# Altium footprint library KM_ALTIUM.PcbLib: 265 footprints (part 5 of 17)
Each footprint in its own frame and in the unit in brackets; x right, y up, seen from the top. Pads: shape width x height; smd on the part's side, far side on the other; paste and mask are expansions set on the pad; w line width, h text height; cw(c..) or ccw(c..) is an arc to the next point about the centre after c.
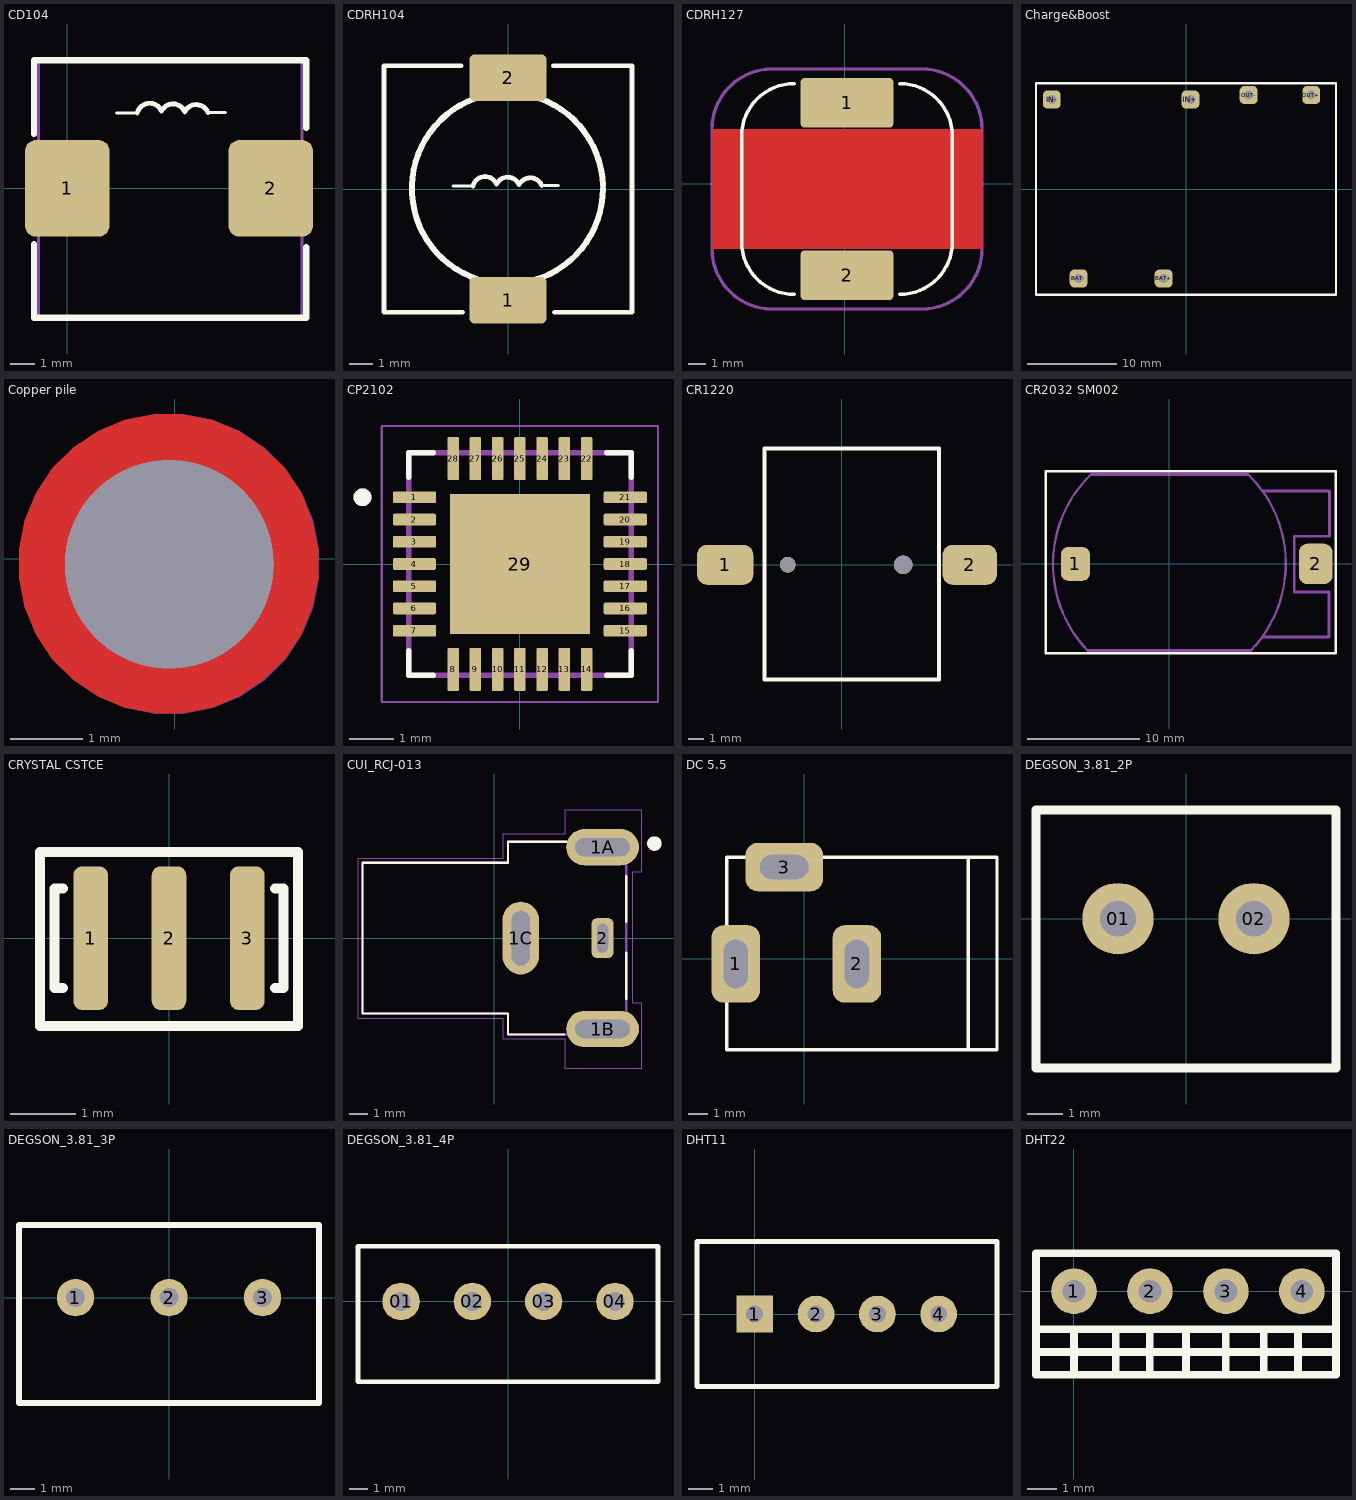
[diagram p4: the footprints below, top view; thin cyan lines are the x and y axes]

## CD104 [mm]
pads (2):
  rrect25% 3.5x4 smd: 1(0,0) 2(8.433,0)
Top Overlay:
  lines w0.127: 2.051,3.117 2.9,3.117 ; 5.832,3.146 6.55,3.146
  lines w0.203: 2.9,3.117 cw(c3.415,2.999) 3.904,3.202 cw(c4.38,2.972) 4.868,3.174 cw(c5.344,2.944) 5.832,3.146
  lines w0.254: -1.372,-2.311 -1.372,-5.359 4.55,-5.359 9.906,-5.359 9.906,-4.635 9.906,-2.438 ; -1.372,2.261 -1.372,5.309 3.839,5.309 9.906,5.309 9.906,2.515
Mechanical 13:
  lines w0.127: -1.194,-5.334 -1.194,5.309 9.728,5.309 9.728,-5.334 -1.194,-5.334
3D body "User Library-cdrh104r.STEP": height 4.01, standoff 0.01, extent -0.983,-5.169 9.517,5.131

## CDRH104 [mm]
pads (2):
  rrect25% 3.3x2 smd: 1(0,-4.742) 2(0,4.742)
Top Overlay:
  lines w0.127: -2.344,0.12 -1.494,0.12 ; 1.438,0.149 2.156,0.149
  lines w0.203: -1.989,5.25 -5.283,5.25 -5.283,-5.25 -1.938,-5.25 ; -1.494,0.12 cw(c-0.979,0.002) -0.49,0.204 cw(c-0.015,-0.026) 0.474,0.177 cw(c0.95,-0.053) 1.438,0.149 ; 1.93,5.25 5.283,5.25 5.283,-5.25 1.981,-5.25 ; 3.175,5.25 3.335,5.25 3.411,5.25
  lines w0.254: 4.045,0.152 ccw(c-0.025,0.025) 4.047,0.025
3D body "User Library-cdrh104r.STEP": height 4.01, standoff 0.01, extent -5.144,-5.25 5.156,5.25

## CDRH127 [mm]
pads (2):
  rrect15% 5.4x2.9 smd: 1(0.127,4.721) 2(0.127,-5.331)
Top Layer:
  pour cut-out: -7.748,3.195 8.002,3.195 8.002,-3.805 -7.748,-3.805
Top Overlay:
  lines w0.2: -2.948,-6.455 cw(c-2.948,-3.38) -6.023,-3.38 -6.023,2.77 cw(c-2.948,2.77) -2.948,5.845 ; 3.202,-6.455 ccw(c3.202,-3.38) 6.277,-3.38 6.277,-0.305 6.277,2.77 ccw(c3.202,2.77) 3.202,5.845
Top Solder:
  pour cut-out: 8.002,3.195 8.877,3.195 8.877,-3.805 8.002,-3.805
  pour cut-out: -8.623,3.195 -7.748,3.195 -7.748,-3.805 -8.623,-3.805
Mechanical 3:
  lines w0.2: -7.748,-3.805 ccw(c-4.248,-3.805) -4.248,-7.305 4.502,-7.305 ccw(c4.502,-3.805) 8.002,-3.805 8.002,3.195 ccw(c4.502,3.195) 4.502,6.695 -4.248,6.695 ccw(c-4.248,3.195) -7.748,3.195 -7.748,-3.805
3D body "SUMIDA-CDRH127.step": height 7.31, standoff -0.14, extent -5.873,-6.476 6.127,5.866

## Charge&Boost [mm]
pads (6):
  rrect50% 2x2 hole 1: BAT+(-2.5,-10) BAT-(-12,-10) IN+(0.5,10) IN-(-15,10) OUT+(14,10.5) OUT-(7,10.5)
Top Overlay:
  lines w0.254: -16.764,-11.811 16.764,-11.811 16.764,11.811 -16.764,11.811 -16.764,-11.811
3D body "Adjustable Step Up 18650 Lithium Battery Charging Discharge Integrated Module.STEP": height 3.8, standoff -0.08, extent -16.763,-12.316 16.637,12.065

## Copper pile [mm]
pads (1):
  round 2.9 hole 2.9 unplated: ""(-0.076,-0.076)
Top Layer:
  pour cut-out: -0.086,-2.154 -0.291,-2.154 -0.694,-2.074 -1.073,-1.917 -1.414,-1.689 -1.704,-1.399 -1.932,-1.057 -2.089,-0.678 -2.17,-0.276 -2.17,-0.071 -2.17,0.135 -2.089,0.537 -1.932,0.916 -1.704,1.257 -1.414,1.548 -1.073,1.776 -0.694,1.933 -0.291,2.013 -0.086,2.013 0.119,2.013 0.522,1.933 0.901,1.776 1.242,1.548 1.532,1.257 1.76,0.916 1.917,0.537 1.997,0.135 1.997,-0.071 1.997,-0.276 1.917,-0.678 1.76,-1.057 1.532,-1.399 1.242,-1.689 0.901,-1.917 0.522,-2.074 0.119,-2.154
Bottom Layer:
  pour cut-out: -0.074,-2.156 -0.28,-2.156 -0.682,-2.076 -1.061,-1.919 -1.402,-1.691 -1.693,-1.401 -1.921,-1.06 -2.078,-0.681 -2.158,-0.278 -2.158,-0.073 -2.158,0.132 -2.078,0.535 -1.921,0.914 -1.693,1.255 -1.402,1.545 -1.061,1.773 -0.682,1.93 -0.28,2.01 -0.074,2.01 0.131,2.01 0.533,1.93 0.913,1.773 1.254,1.545 1.544,1.255 1.772,0.914 1.929,0.535 2.009,0.132 2.009,-0.073 2.009,-0.278 1.929,-0.681 1.772,-1.06 1.544,-1.401 1.254,-1.691 0.913,-1.919 0.533,-2.076 0.131,-2.156
Top Solder:
  region: -0.076,-2.16 -0.281,-2.16 -0.684,-2.08 -1.063,-1.923 -1.404,-1.694 -1.694,-1.404 -1.923,-1.063 -2.08,-0.684 -2.16,-0.281 -2.16,-0.076 -2.16,0.129 -2.08,0.532 -1.923,0.911 -1.694,1.252 -1.404,1.542 -1.063,1.77 -0.684,1.927 -0.281,2.007 -0.076,2.007 0.129,2.007 0.532,1.927 0.911,1.77 1.252,1.542 1.542,1.252 1.77,0.911 1.927,0.532 2.007,0.129 2.007,-0.076 2.007,-0.281 1.927,-0.684 1.77,-1.063 1.542,-1.404 1.252,-1.694 0.911,-1.923 0.532,-2.08 0.129,-2.16
Bottom Solder:
  region: -0.076,-2.16 -0.281,-2.16 -0.684,-2.08 -1.063,-1.923 -1.404,-1.694 -1.694,-1.404 -1.923,-1.063 -2.08,-0.684 -2.16,-0.281 -2.16,-0.076 -2.16,0.129 -2.08,0.532 -1.923,0.911 -1.694,1.252 -1.404,1.542 -1.063,1.77 -0.684,1.927 -0.281,2.007 -0.076,2.007 0.129,2.007 0.532,1.927 0.911,1.77 1.252,1.542 1.542,1.252 1.77,0.911 1.927,0.532 2.007,0.129 2.007,-0.076 2.007,-0.281 1.927,-0.684 1.77,-1.063 1.542,-1.404 1.252,-1.694 0.911,-1.923 0.532,-2.08 0.129,-2.16

## CP2102 [mm] "QFN-28"
pads (29):
  rrect25% 0.97x0.26 smd: 1(-2.37,1.5) 2(-2.37,1) 3(-2.37,0.5) 4(-2.37,0) 5(-2.37,-0.5) 6(-2.37,-1) 7(-2.37,-1.5) 15(2.37,-1.5) 16(2.37,-1) 17(2.37,-0.5) 18(2.37,0) 19(2.37,0.5) 20(2.37,1) 21(2.37,1.5)
  rrect25% 0.26x0.97 smd: 8(-1.5,-2.37) 9(-1,-2.37) 10(-0.5,-2.37) 11(0,-2.37) 12(0.5,-2.37) 13(1,-2.37) 14(1.5,-2.37) 22(1.5,2.37) 23(1,2.37) 24(0.5,2.37) 25(0,2.37) 26(-0.5,2.37) 27(-1,2.37) 28(-1.5,2.37)
  rect 3.15x3.15 smd paste-0.575: 29(0,0)
Top Overlay:
  circle w0.2: c-3.54,1.5 r0.1
  lines w0.127: -2.5,-1.95 -2.5,-2.5 -1.95,-2.5 ; -2.5,1.95 -2.5,2.5 -1.95,2.5 ; 1.95,-2.5 2.5,-2.5 2.5,-1.95 ; 1.95,2.5 2.5,2.5 2.5,1.95
Mechanical 13:
  circle w0.2: c-3.54,1.5 r0.1
  lines w0.127: -2.5,-2.5 -2.5,2.5 2.5,2.5 2.5,-2.5 -2.5,-2.5
Mechanical 15:
  lines w0.05: -3.105,-3.105 -3.105,3.105 3.105,3.105 3.105,-3.105 -3.105,-3.105
3D body "CP2102.STEP": height 1, standoff 0, extent -2.5,-2.5 2.5,2.5

## CR1220 [mm]
pads (4):
  rrect50% 3.66x2.6 smd: 1(-7.57,0)
  rrect50% 3.54x2.6 smd: 2(8.332,0)
  round 1.016 hole 1.016 unplated: ""(-3.5,0)
  round 1.2 hole 1.2 unplated: ""(4,0)
Top Overlay:
  lines w0.254: -5.004,-7.468 -5.004,7.569 6.325,7.569 6.325,-7.468 -5.004,-7.468
3D body "User Library-Battery Holder for CR1220 SMD.STEP": height 4.26, standoff -0.49, extent -8.968,-7.366 9.832,7.383

## CR2032 SM002 [mm]
pads (2):
  rrect50% 2.6x3 smd: 1(-8.363,0)
  rrect50% 3x3.6 smd: 2(13.037,0)
Top Overlay:
  lines w0.254: -10.998,-7.95 -10.998,8.255 14.808,8.255 14.808,-7.95 -10.998,-7.95
Mechanical 13:
  lines w0.203: -7.29,-7.696 cw(c0.762,-0.025) -6.986,7.952 ; 7.024,7.964 cw(c-0.749,0.013) 7.264,-7.696
  lines w0.254: -7.29,-7.696 7.264,-7.696 ; -6.934,7.95 6.985,7.95 ; 8.28,6.5 14.249,6.5 ; 8.357,-6.5 14.199,-6.5 14.199,-2.489 11.125,-2.489 11.125,2.464 14.249,2.464 14.249,6.475
3D body "60488.stp": height 5.41, standoff 0.01, extent -10.413,-7.721 14.237,7.874

## CRYSTAL CSTCE [mm]
height 1
pads (3):
  rrect50% 0.53x2.2 smd: 1(-1.2,0) 2(0,0) 3(1.2,0)
Top Overlay:
  lines w0.152: -1.626,-0.762 -1.753,-0.762 -1.753,0.762 -1.626,0.762 ; 1.626,-0.762 1.753,-0.762 1.753,0.762 1.626,0.762 ; -1.981,-1.346 1.981,-1.346 1.981,1.321 -1.981,1.321 -1.981,-1.346
Mechanical 16:
  lines w0.152: -1.981,-1.346 -1.981,1.321 1.981,1.321 1.981,-1.346 -1.981,-1.346
3D body "SW3dPS-CSTCE.STEP": height 0.7, standoff 0, extent -1.6,-0.65 1.6,0.65

## CUI_RCJ-013 [mm]
pads (4):
  oval 4x2 hole 1 slot 3 at 0 deg: 1A(5.95,5) 1B(5.95,-5)
  oval 2x4 hole 3 slot 1 at 0 deg: 1C(1.45,0)
  rrect50% 1.2x2.2 hole 1.6 slot 0.6 at 0 deg: 2(5.95,0)
Top Overlay:
  circle w0.4: c8.8,5.2 r0.2
  lines w0.127: 3.85,-5.3 0.75,-5.3 0.75,-4.15 -7.25,-4.15 -7.25,4.15 0.75,4.15 0.75,5.3 3.95,5.3 ; 7.25,-3.35 7.25,-0.8 ; 7.25,0.9 7.25,3.4
Mechanical 13:
  lines w0.127: -7.25,-4.15 0.75,-4.15 0.75,-5.3 7.25,-5.3 7.25,5.3 0.75,5.3 0.75,4.15 -7.25,4.15 -7.25,-4.15
Mechanical 15:
  lines w0.05: -7.5,-4.4 0.5,-4.4 0.5,-5.55 3.9,-5.55 3.9,-7.15 8.1,-7.15 8.1,-3.55 7.6,-3.55 7.6,3.65 8.1,3.65 8.1,7.05 3.9,7.05 3.9,5.75 0.5,5.75 0.5,4.4 -7.5,4.4 -7.5,-4.4
3D body "RCJ-013--3DModel-STEP-1.STEP": height 12.4, standoff -4.2, extent -7.25,-5.8 7.25,5.8

## DC 5.5 [mil]
pads (3):
  rrect50% 100x160 hole 50 slot 100 at 90 deg: 1(-141,-11) 2(109,-11)
  rrect50% 160x100 hole 50 slot 100 at 0 deg: 3(-41,189)
Top Overlay:
  lines w7: 339,-188 339,209 ; -160,-188 398,-188 398,209 -160,209 -160,-188
3D body "SW3dPS-dc range - dc connector[4840.2201].STEP": height 433.67, standoff -137.2, extent -150,-180.12 394.35,194.12

## DEGSON_3.81_2P [mm] "2P"
pads (2):
  round 2 hole 1: 01(-1.905,0) 02(1.905,0)
Top Overlay:
  lines w0.254: -4.205,-4.191 -4.205,3.049 4.205,3.049 4.205,-4.191 -4.205,-4.191
3D body "15EDGVC-3.81-02P-14-00A&Z(H).stp": height 9.2, standoff -3.4, extent -4.205,-4.29 4.205,2.95

## DEGSON_3.81_3P [mil] "DEGSON"
pads (3):
  round 60 hole 30: 1(-150,0) 2(0,0) 3(150,0)
Top Overlay:
  lines w10: -240.55,-168.9 -240.55,116.14 240.55,116.14 240.55,-168.9 -240.55,-168.9
3D body "15EDGVC-3.81-03P-14-00A&Z(H).stp": height 362.2, standoff -133.86, extent -240.55,-168.9 240.55,116.14

## DEGSON_3.81_4P [mm] "DEGSON"
pads (4):
  round 2 hole 1: 01(-5.715,0) 02(-1.905,0) 03(1.905,0) 04(5.715,0)
Top Overlay:
  lines w0.254: -8.015,-4.29 -8.015,2.95 8.015,2.95 8.015,-4.29 -8.015,-4.29
3D body "15EDGVC-3.81-04P-14-00A&Z(H).stp": height 9.2, standoff -3.4, extent -8.015,-4.29 8.015,2.95

## DHT11 [mil]
pads (4):
  rect 60x60 hole 27.56: 1(0,0)
  round 60 hole 27.56: 2(100,0) 3(200,0) 4(300,0)
Top Overlay:
  lines w7.87: -94,-118.11 -94,118.11 ; 395,-118.11 395,118.11
  lines w8: -94,-118.11 395,-118.11 ; -94,118.11 395,118.11
3D body "User Library-DHT11.STEP": height 610.74, standoff -314.46, extent -86.44,-108.53 386,108

## DHT22 [mil] "AM2302"
pads (4):
  round 60 hole 30: 1(0,0) 2(100,0) 3(200,0) 4(300,0)
Top Overlay:
  lines w10: -50,-80 345,-80 ; 0,-110 0,-50 ; 55,-110 55,-50 ; 100,-110 100,-50 ; 147.5,-110 147.5,-50 ; 200,-110 200,-50 ; 250,-110 250,-50 ; 295,-105 295,-50 ; -50,-50 -50,50 150,50 345,50 345,-50 ; -50,-50 345,-50 ; -50,-50 -50,-110 345,-110 345,-50
3D body "DHT22.stp": height 992.13, standoff -100, extent -151.18,-208.46 451.18,98.62